# Altium schematic symbol library GRM188R60J226MEA0D.SchLib: 1 symbol
Pins are listed as number, name and electrical type; pins without a type are passive.

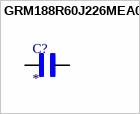
[diagram p0: symbol GRM188R60J226MEA0D]

## GRM188R60J226MEA0D
designator C?
22 ÂµF Â±20% 6.3V Ceramic Capacitor X5R 0603 (1608 Metric); MF: Murata; MP: GRM188R60J226MEA0D; SnapEDA_Link: https://www.snapeda.com/parts/GRM188R60J226MEA0D/Murata/view-part/?ref=snap; Package: 1608 Murata; Value: *; Check_prices: https://www.snapeda.com/parts/GRM188R60J226MEA0D/Murata/view-part/?ref=eda
footprint CAPC1608X100N
pins: 1, 2